# Altium schematic symbol library OOZE_Library.SchLib: 15 symbols
Pins are listed as number, name and electrical type; pins without a type are passive.

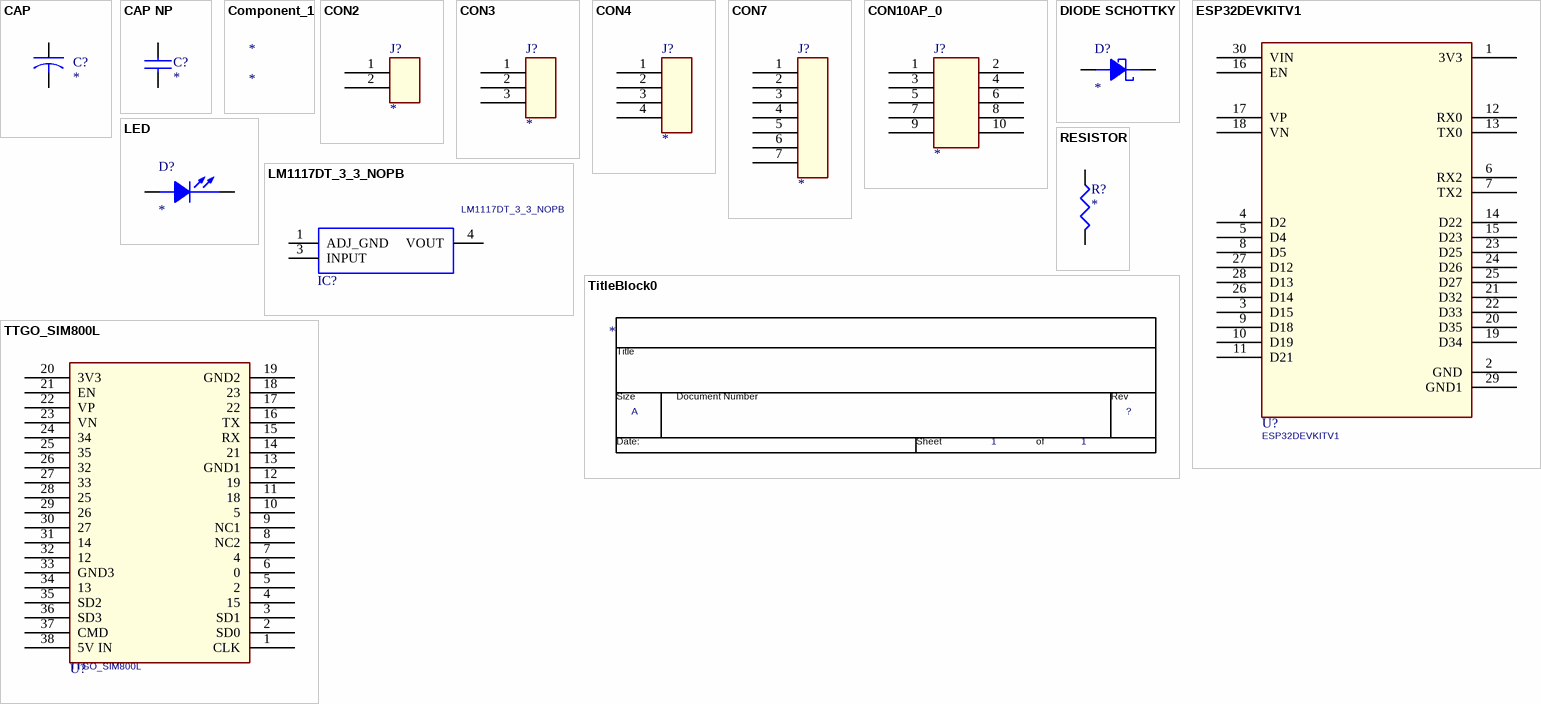
[diagram p0: symbols CAP to TTGO_SIM800L]

## CAP
designator C?
pins: 1, 2

## CAP NP
designator C?
pins: 1, 2

## Component_1
designator *

## CON2
designator J?
pins: 1, 2

## CON3
designator J?
pins: 1, 2, 3

## CON4
designator J?
pins: 1, 2, 3, 4

## CON7
designator J?
pins: 1, 2, 3, 4, 5, 6, 7

## CON10AP_0
designator J?
pins: 1, 2, 3, 4, 5, 6, 7, 8, 9, 10

## DIODE SCHOTTKY
designator D?
pins: 1 ANODE, 2 CATHODE

## ESP32DEVKITV1
designator U?
pins: 1 3V3, 2 GND, 3 D15, 4 D2, 5 D4, 6 RX2, 7 TX2, 8 D5, 9 D18, 10 D19, 11 D21, 12 RX0, 13 TX0, 14 D22, 15 D23, 16 EN, 17 VP, 18 VN, 19 D34, 20 D35, 21 D32, 22 D33, 23 D25, 24 D26, 25 D27, 26 D14, 27 D12, 28 D13, 29 GND1, 30 VIN

## LED
designator D?
pins: 1 CATHODE, 2 ANODE

## LM1117DT_3_3_NOPB
designator IC?
Space saving 800-mA low-dropout linear regulator with internal current limit; Manufacturer_Name: Texas Instruments; Manufacturer_Part_Number: LM1117DT-3.3/NOPB; IsHeterogeneous: False; DevicesInView: 1; DeviceDesignator: A; DeviceNumbering: Alpha; OriginalSymbolOrigin: (0,0); PackageName: LM1117DT_3_3_NOPB; DevicesInPackage: 1; Mouser Part Number: 926-LM1117DT-3.3NOPB; Datasheet Link: https://datasheet.datasheetarchive.com/originals/distributors/Datasheets-SFU2/DSASFU100036103.pdf; Height: 2.38 mm
footprint TO228P991X238-3N
pins: 1 ADJ_GND, 3 INPUT, 4 VOUT

## RESISTOR
designator R?
pins: 1, 2

## TitleBlock0
designator *  Page Size: A  Page Number: 1  (graphical)
Page Create Date: March  8, 1995; RevCode: ?; Page Count: 1
text: Title; Size; Document Number; Rev; Date:; Sheet; of

## TTGO_SIM800L
designator U?
pins: 1 CLK, 2 SD0, 3 SD1, 4 15, 5 2, 6 0, 7 4, 8 NC2, 9 NC1, 10 5, 11 18, 12 19, 13 GND1, 14 21, 15 RX, 16 TX, 17 22, 18 23, 19 GND2, 20 3V3, 21 EN, 22 VP, 23 VN, 24 34, 25 35, 26 32, 27 33, 28 25, 29 26, 30 27, 31 14, 32 12, 33 GND3, 34 13, 35 SD2, 36 SD3, 37 CMD, 38 5V IN